# Altium footprint library chipfc_libs.PCBLIB: 315 footprints (part 19 of 20)
Each footprint in its own frame and in the unit in brackets; x right, y up, seen from the top. Pads: shape width x height; smd on the part's side, far side on the other; paste and mask are expansions set on the pad; w line width, h text height; cw(c..) or ccw(c..) is an arc to the next point about the centre after c.
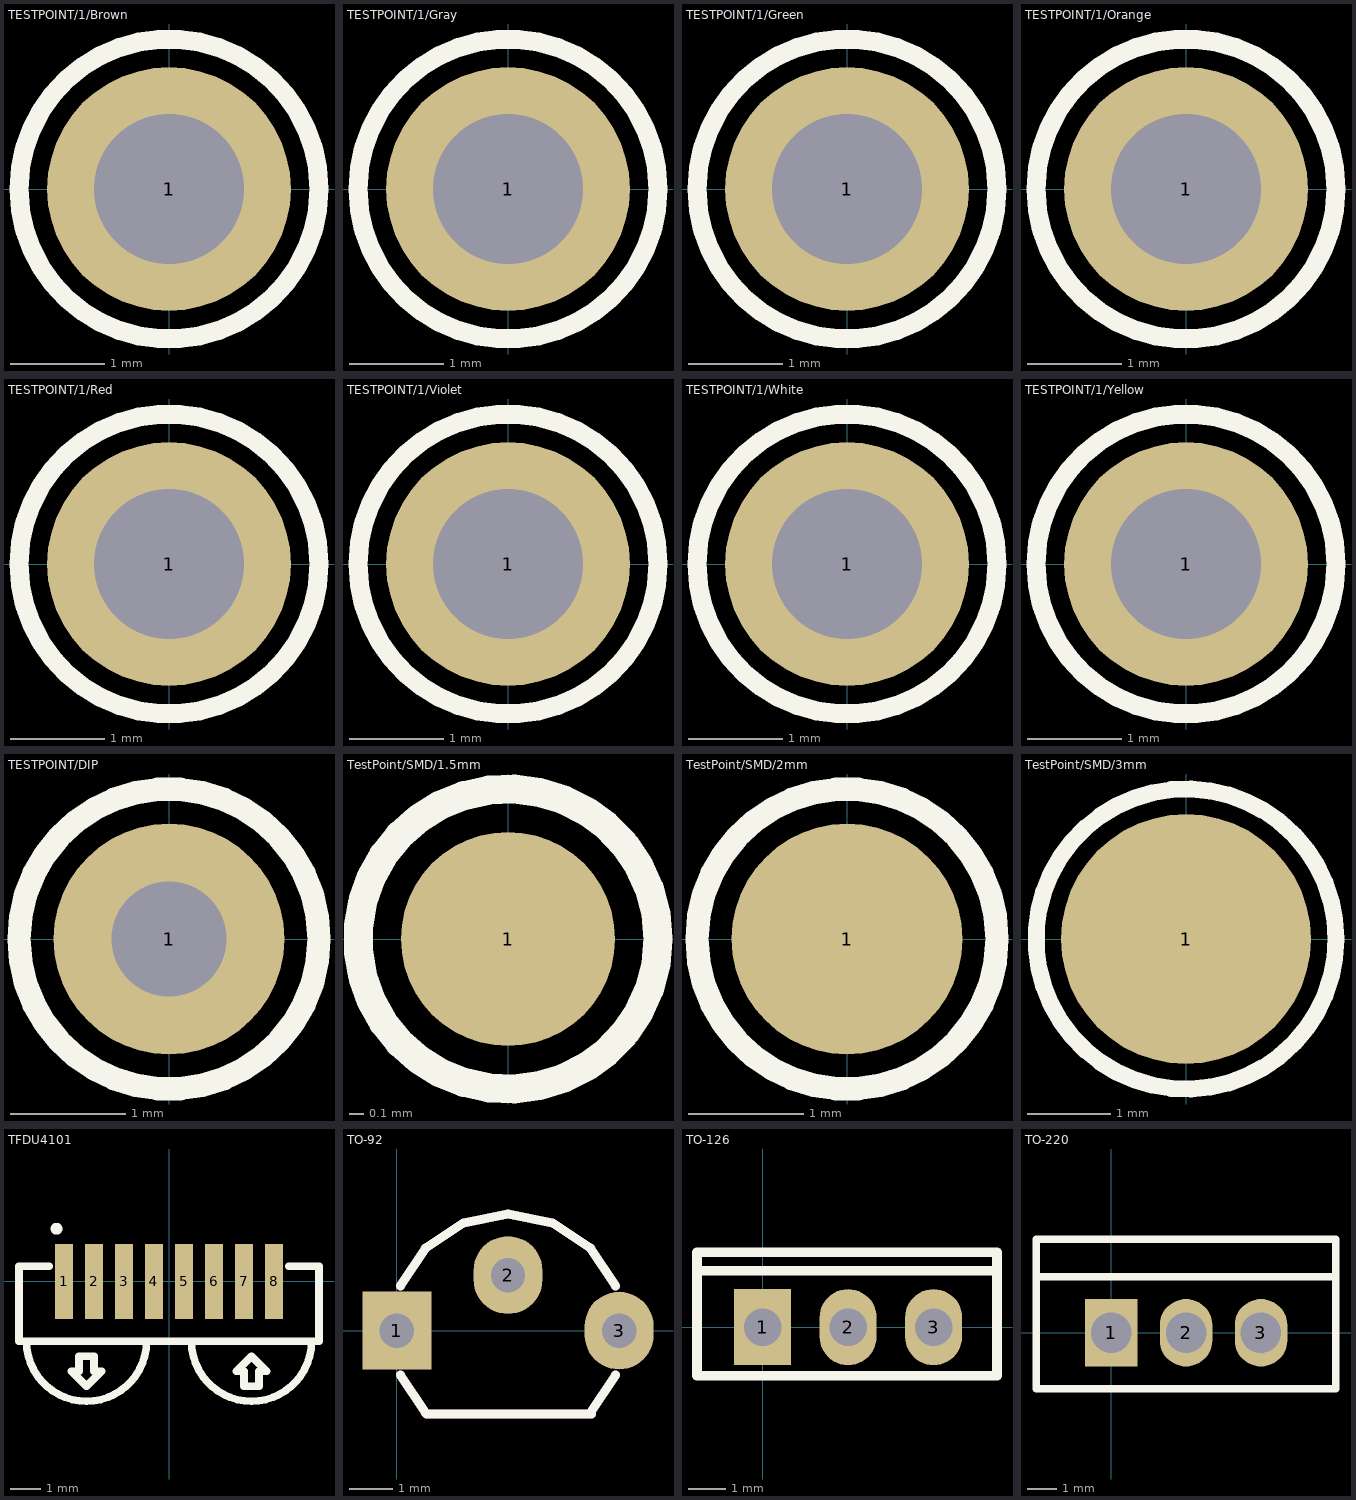
[diagram p18: the footprints below, top view; thin cyan lines are the x and y axes]

## TESTPOINT/1/Brown [mm]
pads (1):
  round 2.6 hole 1.6: 1(0,0)
Top Overlay:
  circle w0.203: c0,0 r1.6
3D body "User Library-TEST POINT BRN Keystone 5125.step": height 8.13, standoff -3.1, extent -1.587,-1.587 1.588,1.588

## TESTPOINT/1/Gray [mm]
pads (1):
  round 2.6 hole 1.6: 1(0,0)
Top Overlay:
  circle w0.203: c0,0 r1.6
3D body "User Library-TEST POINT GRY Keystone 5128.step": height 8.13, standoff -3.1, extent -1.587,-1.587 1.588,1.588

## TESTPOINT/1/Green [mm]
pads (1):
  round 2.6 hole 1.6: 1(0,0)
Top Overlay:
  circle w0.203: c0,0 r1.6
3D body "User Library-TEST POINT GRN Keystone 5126.step": height 8.13, standoff -3.1, extent -1.587,-1.587 1.588,1.588

## TESTPOINT/1/Orange [mm]
pads (1):
  round 2.6 hole 1.6: 1(0,0)
Top Overlay:
  circle w0.203: c0,0 r1.6
3D body "User Library-TEST POINT ORN Keystone 5013.step": height 8.13, standoff -3.1, extent -1.587,-1.587 1.588,1.588

## TESTPOINT/1/Red [mm]
pads (1):
  round 2.6 hole 1.6: 1(0,0)
Top Overlay:
  circle w0.203: c0,0 r1.6
3D body "User Library-TEST POINT RED Keystone 5010.step": height 8.13, standoff -3.1, extent -1.587,-1.587 1.588,1.588

## TESTPOINT/1/Violet [mm]
pads (1):
  round 2.6 hole 1.6: 1(0,0)
Top Overlay:
  circle w0.203: c0,0 r1.6
3D body "User Library-TEST POINT VIO Keystone 5129.step": height 8.13, standoff -3.1, extent -1.587,-1.587 1.588,1.588

## TESTPOINT/1/White [mm]
pads (1):
  round 2.6 hole 1.6: 1(0,0)
Top Overlay:
  circle w0.203: c0,0 r1.6
3D body "User Library-TEST POINT WHT Keystone 5012.step": height 8.13, standoff -3.1, extent -1.587,-1.587 1.588,1.588

## TESTPOINT/1/Yellow [mm]
pads (1):
  round 2.6 hole 1.6: 1(0,0)
Top Overlay:
  circle w0.203: c0,0 r1.6
3D body "User Library-TEST POINT YEL Keystone 5014.step": height 8.13, standoff -3.1, extent -1.587,-1.587 1.588,1.588

## TESTPOINT/DIP [mm]
pads (1):
  round 2 hole 1: 1(0,0)
Top Overlay:
  circle w0.203: c0,0 r1.3
3D body "User Library-Test Point Keystone - 5000 RED.STEP": height 4.57, standoff -3.05, extent -1.27,-1.27 1.27,1.27

## TestPoint/SMD/1.5mm [mm]
pads (1):
  round 1.5 smd: 1(0,0)
Top Overlay:
  circle w0.203: c0,0 r1.05

## TestPoint/SMD/2mm [mm]
pads (1):
  round 2 smd: 1(0,0)
Top Overlay:
  circle w0.203: c0,0 r1.3

## TestPoint/SMD/3mm [mm]
pads (1):
  round 3 smd: 1(0,0)
Top Overlay:
  circle w0.203: c0,0 r1.8

## TFDU4101 [mm]
pads (8):
  rect 0.6x2.5 smd: 1(-3.5,0) 2(-2.5,0) 3(-1.5,0) 4(-0.5,0) 5(0.5,0) 6(1.5,0) 7(2.5,0) 8(3.5,0)
Top Overlay:
  circle w0.254: c-3.75,1.75 r0.071
  lines w0.254: -4.75,-2 ccw(c-2.75,-2) -2.75,-4 ccw(c-2.75,-2) -0.75,-2 ; -4,0.5 -5,0.5 -5,-2 5,-2 5,0.5 4,0.5 ; 0.75,-2 ccw(c2.75,-2) 2.75,-4 ccw(c2.75,-2) 4.75,-2 ; -3.25,-3 -2.75,-3.5 ; -3.25,-3 -3.25,-3 ; -3.25,-3 -3,-3 -3,-2.5 -2.5,-2.5 -2.5,-3 -2.25,-3 -2.75,-3.5 ; -2.75,-3.5 -2.75,-3.5 ; 2.75,-2.5 3.25,-3 ; 2.75,-2.5 2.75,-2.5 ; 2.75,-2.5 2.25,-3 2.5,-3 2.5,-3.5 3,-3.5 3,-3 3.25,-3 ; 3.25,-3 3.25,-3

## TO-92 [mil]
pads (3):
  rect 62x70 hole 31: 1(0,0)
  oval 62x70 hole 31: 2(100,50) 3(200,0)
Top Overlay:
  lines w8: 3.1,-40.1 25.8,-74.2 26.6,-75 175,-75 ; 3.1,40.1 25.8,74.2 59.9,96.9 100,104.9 140.1,96.9 174.2,74.2 196.9,40.1 ; 174.2,-74.2 196.9,-40.1
Mechanical 1:
  lines w8: 3.1,-40.1 25.8,-74.2 26.6,-75 175,-75 ; 3.1,40.1 25.8,74.2 59.9,96.9 100,104.9 140.1,96.9 174.2,74.2 196.9,40.1 ; 174.2,-74.2 196.9,-40.1

## TO-126 [mil]
pads (3):
  rect 60x80 hole 39.37: 1(0,0)
  oval 60x80 hole 39.37: 2(89.76,0) 3(179.53,0)
Top Overlay:
  lines w10: -68.9,59.06 246.06,59.06 ; -68.9,-51.18 -68.9,78.74 246.06,78.74 246.06,-51.18 -68.9,-51.18
3D body "User Library-BD135 (TO-126,SOT32) v4.step": height 614.17, standoff -92.33, extent -63.49,-70.82 243.6,35.49

## TO-220 [mil]
pads (3):
  rect 70x90 hole 54: 1(0,0)
  oval 70x90 hole 54: 2(100,0) 3(200,0)
Top Overlay:
  lines w10: -100,75 300,75 ; -100,-75 300,-75 300,125 -100,125 -100,-75
3D body "CircuitWorks-TO-220HS.step": height 730, standoff -150, extent -100,-50 300,130